# Altium schematic symbol library TPS62133RGTR.SchLib: 1 symbol
Pins are listed as number, name and electrical type; pins without a type are passive.

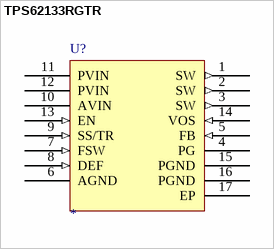
[diagram p0: symbol TPS62133RGTR]

## TPS62133RGTR
designator U?
3-17 V 3 A step-down converter, VQFN-16 3x3 + EP (pinout from memory of the TI TPS6213x datasheet - VERIFY against the datasheet before use)
footprint VQFN-16-1EP_3x3mm_P0.5mm_EP1.68x1.68mm
pins: 1 SW (out), 2 SW (out), 3 SW (out), 4 PG (oc), 5 FB (in), 6 AGND (power), 7 FSW (in), 8 DEF (in), 9 SS/TR (in), 10 AVIN (power), 11 PVIN (power), 12 PVIN (power), 13 EN (in), 14 VOS (in), 15 PGND (power), 16 PGND (power), 17 EP (power)